# Altium footprint library 2020-12-12_14-36-10.PcbLib: 1 footprints
Each footprint in its own frame and in the unit in brackets; x right, y up, seen from the top. Pads: shape width x height; smd on the part's side, far side on the other; paste and mask are expansions set on the pad; w line width, h text height; cw(c..) or ccw(c..) is an arc to the next point about the centre after c.
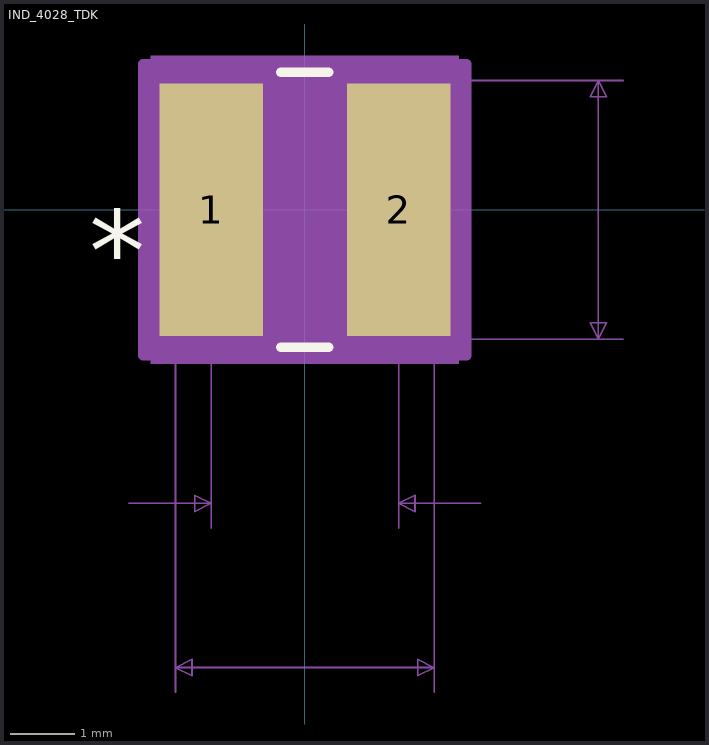
[diagram p0: the footprint, top view; thin cyan lines are the x and y axes]

## IND_4028_TDK [mm]
pads (2):
  rect 1.6x3.9 smd paste+0 mask+0: 1(-1.45,0) 2(1.45,0)
Top Overlay:
  lines w0.152: -0.368,-2.127 0.368,-2.127 ; -0.368,2.127 0.368,2.127
  text "*" at -3.334,-1.27 h1.27
Mechanical 5:
  region: -2.381,2.381 2.381,2.381 2.381,-2.381 -2.381,-2.381
Mechanical 7:
  lines w0.025: -2.72,-4.54 -1.45,-4.54 ; -2,-7.461 -2,-2 ; -1.45,-4.921 -1.45,0 ; 1.45,-4.921 1.45,0 ; 2,-7.461 2,-2 4.921,-2 ; 2,2 4.921,2 ; 2.72,-4.54 1.45,-4.54 ; -2,-7.08 2,-7.08 ; -2,-7.08 -1.746,-6.953 -1.746,-7.207 -2,-7.08 ; -1.45,-4.54 -1.704,-4.413 -1.704,-4.667 -1.45,-4.54 ; 1.45,-4.54 1.704,-4.413 1.704,-4.667 1.45,-4.54 ; 2,-7.08 1.746,-6.953 1.746,-7.207 2,-7.08 ; 4.54,-2 4.54,2 ; 4.54,-2 4.413,-1.746 4.667,-1.746 4.54,-2 ; 4.54,2 4.413,1.746 4.667,1.746 4.54,2
  text "Default Padstyle: RX62p99Y153p54D0T" at -11.112,-10.89 h1.27
  text "Alt 1 Padstyle: OX60Y90D30P" at -8.572,-12.795 h1.27
  text "Alt 2 Padstyle: OX90Y60D30P" at -8.572,-14.7 h1.27
  text "0.114in/2.9mm" at -2.064,-5.683 h0.64
  text "0.157in/4mm" at 5.048,1.683 h0.64
  text "0.157in/4mm" at -1.746,-8.223 h0.64
Mechanical 13:
  lines w0.025: -2,-1 -2,1 -1,2 1,2 2,1 2,-1 1,-2 -1,-2 -2,-1
  text "*" at -1.81,-1.27 h1.27
Mechanical 15:
  region: 2.504,-2.254 -2.504,-2.254 -2.504,2.254 2.504,2.254
  lines w0.152: -2.504,-2.254 -2.504,2.254 2.504,2.254 2.504,-2.254 -2.504,-2.254
3D body: height 0.25, standoff 0, extent 0,0 0.254,0.254